# Altium footprint library BGA28C40P4X7_188X301X50.PcbLib: 1 footprints
Each footprint in its own frame and in the unit in brackets; x right, y up, seen from the top. Pads: shape width x height; smd on the part's side, far side on the other; paste and mask are expansions set on the pad; w line width, h text height; cw(c..) or ccw(c..) is an arc to the next point about the centre after c.
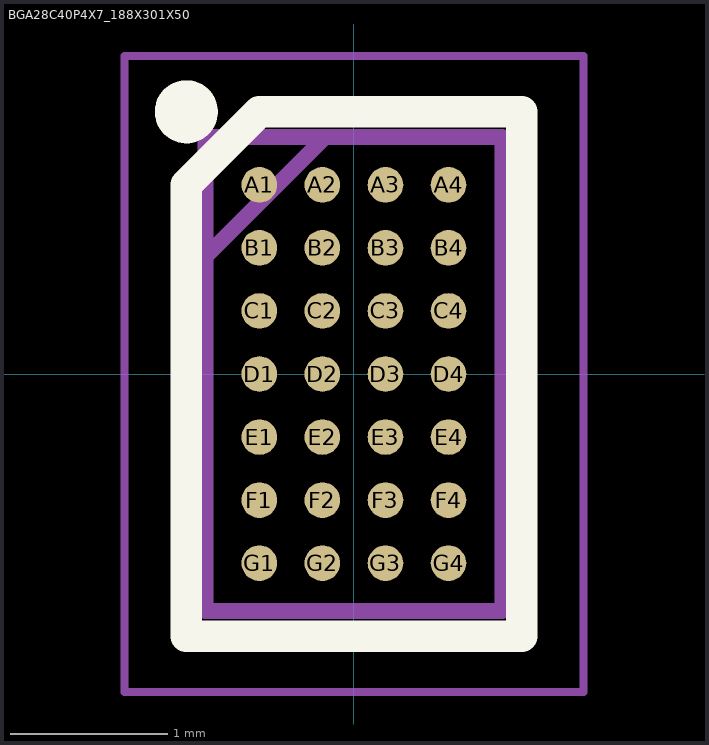
[diagram p0: the footprint, top view; thin cyan lines are the x and y axes]

## BGA28C40P4X7_188X301X50 [mm]
pads (28):
  round 0.226 smd: A1(-0.6,1.2) A2(-0.2,1.2) A3(0.2,1.2) A4(0.6,1.2) B1(-0.6,0.8) B2(-0.2,0.8) B3(0.2,0.8) B4(0.6,0.8) C1(-0.6,0.4) C2(-0.2,0.4) C3(0.2,0.4) C4(0.6,0.4) D1(-0.6,0) D2(-0.2,0) D3(0.2,0) D4(0.6,0) E1(-0.6,-0.4) E2(-0.2,-0.4) E3(0.2,-0.4) E4(0.6,-0.4) F1(-0.6,-0.8) F2(-0.2,-0.8) F3(0.2,-0.8) F4(0.6,-0.8) G1(-0.6,-1.2) G2(-0.2,-1.2) G3(0.2,-1.2) G4(0.6,-1.2)
Top Overlay:
  circle w0.2: c-1.063,1.663 r0.1
  lines w0.2: -1.063,-1.663 1.063,-1.663 1.063,1.663 -0.6,1.663 -1.063,1.2 -1.063,-1.663
Mechanical 15:
  lines w0.1: -0.941,0.744 -0.182,1.503 ; -0.941,-1.503 0.941,-1.503 0.941,1.503 -0.941,1.503 -0.941,-1.503
Mechanical 20:
  lines w0.05: -1.456,-2.018 1.457,-2.018 1.457,2.018 -1.456,2.018 -1.456,-2.018